# EAGLE library part MOLEX---52271-0879_MOLEX_52271-0879 (library HA_FONA_LARA_20)
MOLX-52271-0879
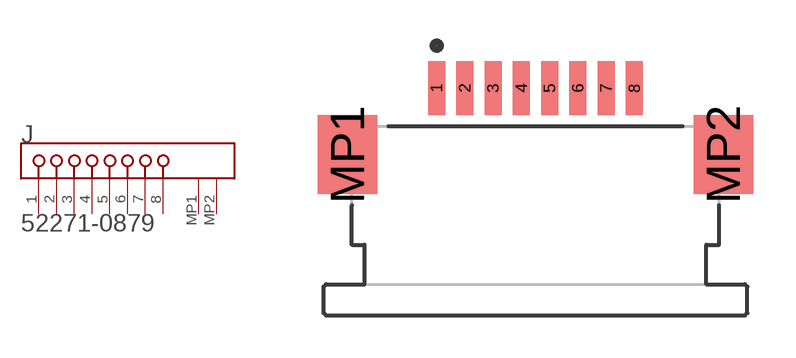
[diagram p5: symbol with the pads of MOLEX---52271-0879_MOLEX_52271-0879_0; footprint MOLEX---52271-0879_MOLEX_52271-0879_0]

Designator prefix J

## MOLEX---52271-0879_MOLEX_52271-0879MOLEX_52271-0879_0_0 (CIIVA_IDS: 605436; CIRCUITS_LOADED: 8; COMPONENT_LINK_1_DESCRIPTION: Manufacturer URL; COMPONENT_LINK_1_URL: http://www.molex.com/molex/index.jsp; COMPONENT_LINK_3_DESCRIPTION: Package Specification; COMPONENT_LINK_3_URL: http://www.molex.com/pdm_docs/sd/522710879_sd.pdf; CONTACT_POSITION: Bottom; CURRENT_MAX_PER_CONTACT: 0.5A; DATASHEET: http://www.molex.com/webdocs/datasheets/pdf/en-us/0522710879_FFC_FPC_CONNECTORS.pdf; DURABILITY_MATING_CYCLES_MAX: 30; ENTRY_ANGLE: 90degrees Angle; FOOTPRINT_VARIANT_NAME_0: Manufacturer Recommended; IMPORTED: yes; IMPORTED_FROM: vault; IMPORT_TS: 1521845783; MATED_HEIGHT: 3.00mm; MATERIAL___METAL: Phosphor Bronze; MATERIAL___PLATING_MATING: Tin-Bismuth; MATERIAL___PLATING_TERMINATION: Tin-Bismuth; MF: Molex; MOUNTING_TECHNOLOGY: Surface Mount; MPN: 52271-0879; NUMBER_OF_ROWS: 1; ORIENTATION: Right Angle; PACKAGE: 52271-0879; PACKAGE_DESCRIPTION: 8-Lead FPC Connector, Pitch 1.0 mm; PACKAGE_VERSION: Rev. B, 04/2004; PACKING: Tape and Reel; PCB_LOCATOR: No; PCB_RETENTION: Yes; PITCH___MATING_INTERFACE: 1.00mm; PITCH___TERMINATION_INTERFACE: 1.00mm; POLARIZED_TO_PCB: Yes; PREFIX: J; RELEASE_DATE: 1411372468; ROHS: Yes; STACKABLE: No; VAULT_GUID: 6E0E35AC-EB58-4C9C-8B40-B34D68BAFD49; VAULT_REVISION: B8D0B5D1-BD2E-4A74-BF2B-C0B6D1E0611E; VOLTAGE_MAX: 50V AC (RMS)/DC)  [MOLEX---52271-0879_MOLEX_52271-0879_0]
1  1  pas
2  2  pas
3  3  pas
4  4  pas
5  5  pas
6  6  pas
7  7  pas
8  8  pas
MP1  MP1  pas
MP2  MP2  pas

## Footprint MOLEX---52271-0879_MOLEX_52271-0879_0 (pad centres in mm)
MOLX-52271-0879
smd 0.6 x 1.9: 1 -3.5,1.175; 2 -2.5,1.175; 3 -1.5,1.175; 4 -0.5,1.175; 5 0.5,1.175; 6 1.5,1.175; 7 2.5,1.175; 8 3.5,1.175
smd 2.1 x 2.8: MP1 -6.65,-1.175; MP2 6.65,-1.175